# Altium footprint library PcbLib1.PcbLib: 3 footprints
Each footprint in its own frame and in the unit in brackets; x right, y up, seen from the top. Pads: shape width x height; smd on the part's side, far side on the other; paste and mask are expansions set on the pad; w line width, h text height; cw(c..) or ccw(c..) is an arc to the next point about the centre after c.
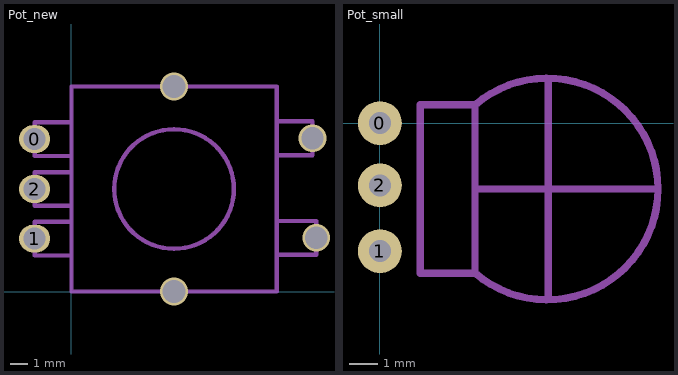
[diagram p0: the footprints below, top view; thin cyan lines are the x and y axes]

## Ext_pad [mil]

## Pot_new [mil]
pads (3):
  oval 71.81x63.94 hole 51: 0(-85,351.2) 1(-85,121.91) 2(-85,236.2)
via 563.58,123.8 diameter 64 hole 51
via 236.22,0 diameter 64 hole 52.2
via 555,353.09 diameter 64 hole 51
via 236.22,472.44 diameter 64 hole 52.2
Mechanical 1:
  circle w10: c236.22,236.22 r137.8
  lines w10: -1.85,83.11 -85,83.11 -85,160.72 -1.85,160.72 ; 0,118.11 0,0 ; 0,197.4 -85,197.4 -85,275 0,275 ; 0,312.4 -85,312.4 -85,390 0,390 ; 0,354.33 0,472.44 ; 475,85 563.58,85 563.58,104.4 ; 475,162.6 563.58,162.6 563.58,143.2 ; 476.85,314.28 555,314.28 555,333.69 ; 476.85,391.89 555,391.89 555,372.49 ; 0,0 472.44,0 472.44,472.44 0,472.44 ; 0,0 0,472.44 ; 555,333.69 555,372.49 ; 555,333.69 565,343.69 565,362.49 555,372.49 ; 563.58,104.4 563.58,143.2 ; 563.58,104.4 570,110.82 570,136.79 563.58,143.2
3D body: height 50, standoff 43.31, extent 465,325 570,375
3D body: height 50, standoff 43.31, extent 465,100 570,150
3D body: height 50, standoff -39.37, extent 565,325 570,375
3D body: height 50, standoff -39.37, extent 570,100 575,150
3D body: height 50, standoff -39.37, extent 210,-5 260,0
3D body: height 50, standoff -39.37, extent 210,470 260,475
3D body: height 50, standoff -39.37, extent -95,95 -85,145
3D body: height 50, standoff -39.37, extent -90,210 -80,260
3D body: height 50, standoff -39.37, extent -95,325 -85,375
3D body: height 50, standoff 43.31, extent -90.44,95 15,375
3D body: height 314.96, standoff 0, extent 0,0 472.44,472.44
3D body: height 866.14, standoff 0, extent 98.43,98.43 374.02,374.02

## Pot_small [mil]
height 78.74
pads (3):
  round 60 hole 30: 0(0,0) 1(0,-175) 2(0,-85)
Mechanical 1:
  lines w10: 130,-90 380,-90 ; 230,-240 230,60 ; 130,-205 ccw(c228.6,-90) 130,25 ; 130,-205 130,25 ; 130,-205 55,-205 55,25 130,25
3D body: height 50, standoff 0, extent 65,-235 355,55
3D body: height 10, standoff 0, extent 55,-205 130,25